# Altium footprint library KF126-2P.PcbLib: 1 footprints
Each footprint in its own frame and in the unit in brackets; x right, y up, seen from the top. Pads: shape width x height; smd on the part's side, far side on the other; paste and mask are expansions set on the pad; w line width, h text height; cw(c..) or ccw(c..) is an arc to the next point about the centre after c.
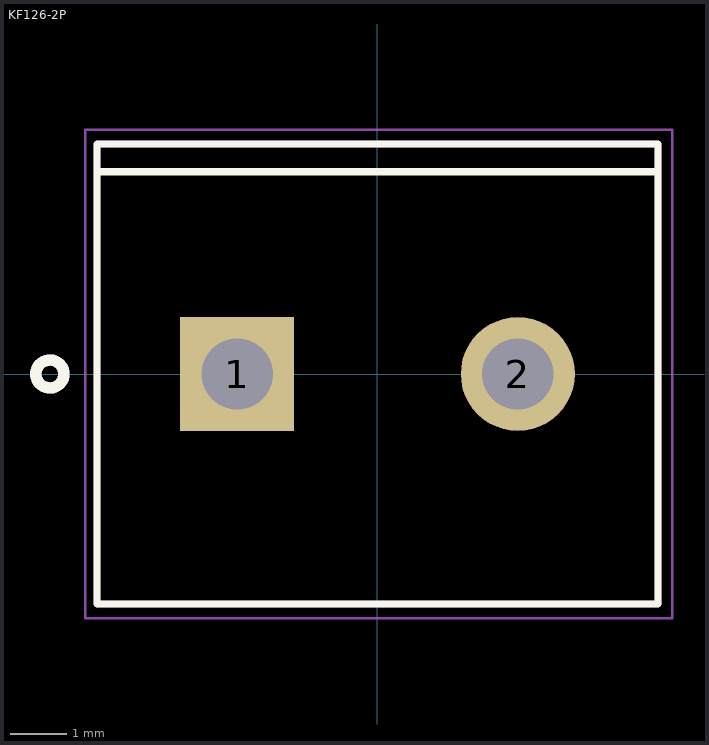
[diagram p0: the footprint, top view; thin cyan lines are the x and y axes]

## KF126-2P [mil] "KF126-2P"
pads (2):
  rect 80x80 hole 50: 1(-98.43,0)
  round 80 hole 50: 2(98.43,0)
Top Overlay:
  circle w8: c-229.8,0 r9.84
  lines w5: -196.49,141.83 196.7,141.83 ; -196.85,-161.42 -196.85,161.42 196.85,161.42 196.85,-161.42 -196.85,-161.42
Mechanical 13:
  circle w8: c-229.8,0 r9.84
  lines w5: -196.85,-161.42 -196.85,161.42 196.85,161.42 196.85,-161.42 -196.85,-161.42
Mechanical 15:
  lines w1.97: -205,-171.26 206.69,-171.26 206.69,171.26 -205,171.26 -205,-171.26
3D body "KF126-2P.STEP": height 393.7, standoff -137.8, extent -220.47,-161.42 196.85,161.42